# Altium footprint library FootPrintLib_9.PcbLib: 287 footprints (part 5 of 18)
Each footprint in its own frame and in the unit in brackets; x right, y up, seen from the top. Pads: shape width x height; smd on the part's side, far side on the other; paste and mask are expansions set on the pad; w line width, h text height; cw(c..) or ccw(c..) is an arc to the next point about the centre after c.
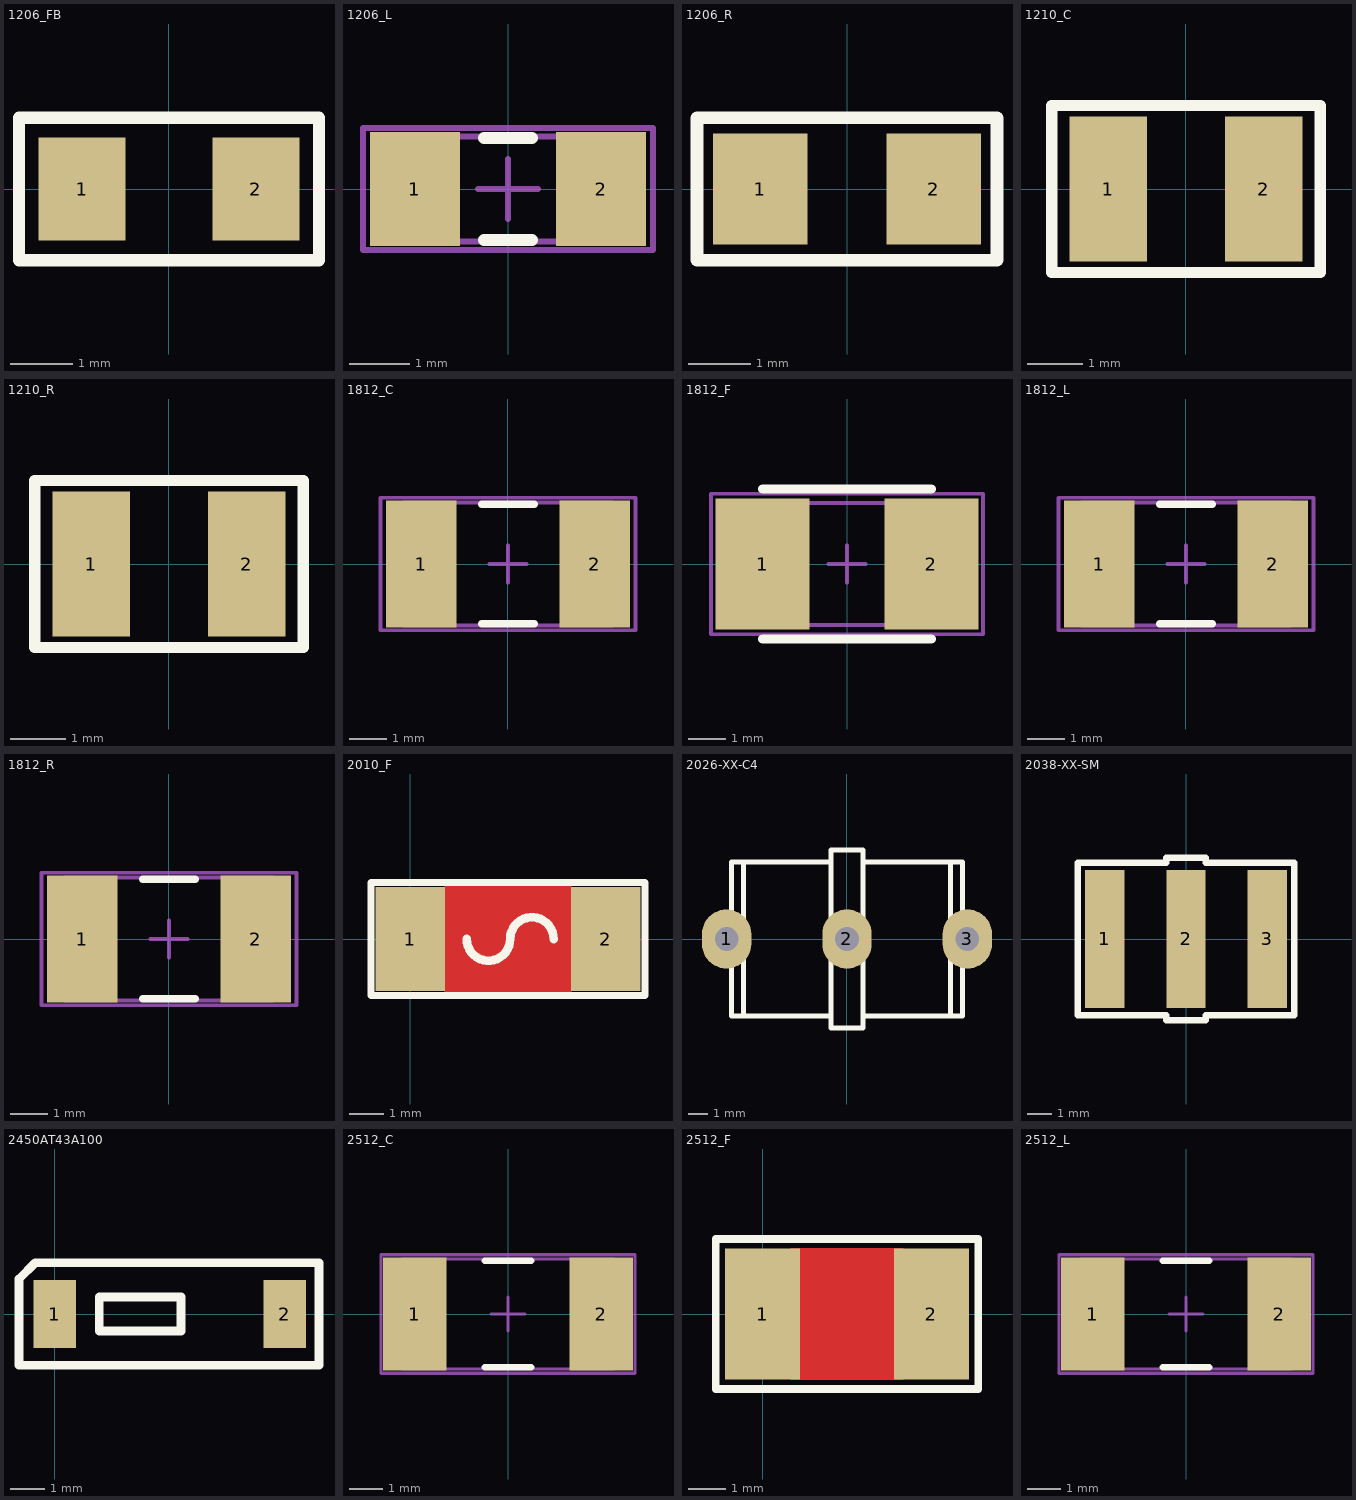
[diagram p4: the footprints below, top view; thin cyan lines are the x and y axes]

## 1206_FB [mil] "Ferrite Bead"
pads (2):
  rect 55x65 smd: 1(-55,0) 2(55,0)
Top Overlay:
  lines w7.87: -95,-45 -95,45 95,45 95,-45 -95,-45
3D body "User Library-1206 Ferrite bead.STEP": height 25.63, standoff -25.63, extent -63,-31.5 63,31.5

## 1206_L [mm] "Inductor"
height 0.71
pads (2):
  rect 1.5x1.9 smd: 1(-1.55,0) 2(1.55,0)
Top Overlay:
  lines w0.2: -0.4,-0.85 0.4,-0.85 ; -0.4,0.85 0.4,0.85
Mechanical 13:
  lines w0.1: -1.675,-0.875 1.675,-0.875 1.675,0.875 -1.675,0.875 -1.675,-0.875
Mechanical 15:
  lines w0.1: -0.5,0 0.5,0 ; 0,-0.5 0,0.5 ; -2.413,-1.016 2.413,-1.016 2.413,1.016 -2.413,1.016 -2.413,-1.016
3D body "User Library-1206(3216M) Res.step": height 1.53, standoff 0, extent -2,-0.8 2,0.8

## 1206_R [mil] "Resistor"
pads (2):
  rect 60x70 smd: 1(-55,0) 2(55,0)
Top Overlay:
  lines w7.87: -95,-45 95,-45 ; -95,45 95,45
  lines w8: -95,-45 -95,45 ; 95,-45 95,45
3D body "User Library-1206(3216M) Res.STEP": height 60.1, standoff 0, extent -78.74,-31.5 78.76,31.51

## 1210_C [mil] "Capacitor"
pads (2):
  rect 55x102.36 smd: 1(-55,0) 2(55,0)
Top Overlay:
  lines w7.87: -95,-59.06 95,-59.06 95,59.06 -95,59.06 -95,-59.06
3D body "1210 CAPACITOR.stp": height 84.41, standoff 1.74, extent -66.93,-53.15 66.92,53.15

## 1210_R [mil] "Resistor"
pads (2):
  rect 55x102.36 smd: 1(-55,0) 2(55,0)
Top Overlay:
  lines w7.87: -95,-59.06 95,-59.06 95,59.06 -95,59.06 -95,-59.06
3D body "User Library-R_1210.STEP": height 23.62, standoff 0, extent -62.98,-49.21 63,49.21

## 1812_C [mm] "Surface mount capacitor 1812"
height 1.7
pads (2):
  rect 1.9x3.4 smd: 1(-2.331,0) 2(2.331,0)
Top Overlay:
  lines w0.2: -0.7,-1.6 0.7,-1.6 ; -0.7,1.6 0.7,1.6
Mechanical 13:
  lines w0.1: -2.794,-1.651 2.794,-1.651 2.794,1.651 -2.794,1.651 -2.794,-1.651
Mechanical 15:
  lines w0.1: -0.5,0 0.5,0 ; 0,-0.5 0,0.5 ; -3.429,-1.778 3.429,-1.778 3.429,1.778 -3.429,1.778 -3.429,-1.778
3D body "User Library-1812(4532M) Cap.step": height 2.54, standoff 0, extent -2.81,-1.6 2.81,1.6

## 1812_F [mil] "Surface mount FUSE 1812"
pads (2):
  rect 100x140 smd: 1(-90,0) 2(90,0)
Top Overlay:
  lines w10: -90,-80 90,-80 ; -90,80 90,80
Mechanical 13:
  lines w3.94: -95,-65 95,-65 95,65 -95,65 -95,-65
Mechanical 15:
  lines w3.94: -19.69,0 19.68,0 ; 0,-19.68 0,19.69 ; -145,-75 -145,75 145,75 145,-75 -145,-75
3D body "User Library-FUSE-1812-GOLDEN.step": height 51.97, standoff 0, extent -94.88,-63.38 94.89,63.39

## 1812_L [mm] "Inductor"
height 1.7
pads (2):
  rect 1.9x3.4 smd: 1(-2.331,0) 2(2.331,0)
Top Overlay:
  lines w0.2: -0.7,-1.6 0.7,-1.6 ; -0.7,1.6 0.7,1.6
Mechanical 13:
  lines w0.1: -2.794,-1.651 2.794,-1.651 2.794,1.651 -2.794,1.651 -2.794,-1.651
Mechanical 15:
  lines w0.1: -0.5,0 0.5,0 ; 0,-0.5 0,0.5 ; -3.429,-1.778 3.429,-1.778 3.429,1.778 -3.429,1.778 -3.429,-1.778
3D body "User Library-1812(4532M) Res.step": height 2.54, standoff 0, extent -2.81,-1.6 2.81,1.6

## 1812_R [mm] "Resistor"
height 1.7
pads (2):
  rect 1.9x3.4 smd: 1(-2.331,0) 2(2.331,0)
Top Overlay:
  lines w0.2: -0.7,-1.6 0.7,-1.6 ; -0.7,1.6 0.7,1.6
Mechanical 13:
  lines w0.1: -2.794,-1.651 2.794,-1.651 2.794,1.651 -2.794,1.651 -2.794,-1.651
Mechanical 15:
  lines w0.1: -0.5,0 0.5,0 ; 0,-0.5 0,0.5 ; -3.429,-1.778 3.429,-1.778 3.429,1.778 -3.429,1.778 -3.429,-1.778
3D body "User Library-1812(4532M) Res.step": height 2.54, standoff 0, extent -2.81,-1.6 2.81,1.6

## 2010_F [mil]
pads (2):
  rect 80x120 smd: 1(0,0) 2(225,0)
Top Layer:
  pour cut-out: 40,65 185,65 185,-65 40,-65
Top Overlay:
  lines w8: -45,-65 270,-65 270,65 -45,65 -45,-65
  lines w10: 65,0 ccw(c90,0) 115,0 cw(c140,0) 165,0

## 2026-XX-C4 [mm] "3 Electrode Surge Arrester"
height 9
pads (3):
  oval 2.5x3 hole 1.2: 1(-6.1,0) 2(0,0) 3(6.1,0)
Top Overlay:
  lines w0.254: -5.25,-3.9 -5.25,3.9 ; -0.8,-3.9 -5.85,-3.9 -5.85,3.9 -0.8,3.9 ; 0.8,-3.9 5.85,-3.9 5.85,3.9 0.8,3.9 ; 5.25,-3.9 5.25,3.9 ; -0.8,-4.5 -0.8,4.5 0.8,4.5 0.8,-4.5 -0.8,-4.5

## 2038-XX-SM [mm] "3 Electrode Surface Mount Gas Discharge Tube"
height 5
pads (3):
  rect 1.6x5.6 smd: 1(-3.3,0) 2(0,0) 3(3.3,0)
Top Overlay:
  lines w0.254: -4.4,-3.1 -4.4,3.1 -0.8,3.1 -0.8,3.3 0.8,3.3 0.8,3.1 4.4,3.1 4.4,-3.1 0.8,-3.1 0.8,-3.3 -0.8,-3.3 -0.8,-3.1 -4.4,-3.1

## 2450AT43A100 [mm]
pads (2):
  rect 1.25x2 smd: 1(0,0) 2(6.75,0)
Top Overlay:
  lines w0.254: -1.05,-1.5 7.75,-1.5 7.75,1.5 -0.575,1.5 -1.05,1.025 -1.05,-1.5 ; 1.3,-0.5 3.7,-0.5 3.7,0.5 1.3,0.5 1.3,-0.5

## 2512_C [mm] "Surface mount capacitor 2512"
height 1.7
pads (2):
  rect 1.9x3.4 smd: 1(-2.8,0) 2(2.8,0)
Top Overlay:
  lines w0.2: -0.7,-1.6 0.7,-1.6 ; -0.7,1.6 0.7,1.6
Mechanical 13:
  lines w0.1: -3.175,-1.651 3.175,-1.651 3.175,1.651 -3.175,1.651 -3.175,-1.651
Mechanical 15:
  lines w0.1: -0.5,0 0.5,0 ; 0,-0.5 0,0.5 ; -3.81,-1.778 3.81,-1.778 3.81,1.778 -3.81,1.778 -3.81,-1.778
3D body "User Library-2512(6432M) Cap.step": height 3.21, standoff -0.01, extent -3.464,-1.61 3.464,1.615

## 2512_F [mm]
pads (2):
  rect 2x3.5 smd: 1(0,0) 2(4.5,0)
Top Layer:
  pour cut-out: 0.75,1.75 3.75,1.75 3.75,-1.75 0.75,-1.75
Top Overlay:
  lines w0.203: -1.25,-2 -1.25,2 5.75,2 5.75,-2 -1.25,-2

## 2512_L [mm] "Inductor"
height 1.7
pads (2):
  rect 1.9x3.4 smd: 1(-2.8,0) 2(2.8,0)
Top Overlay:
  lines w0.2: -0.7,-1.6 0.7,-1.6 ; -0.7,1.6 0.7,1.6
Mechanical 13:
  lines w0.1: -3.175,-1.651 -3.175,1.651 3.175,1.651 3.175,-1.651 -3.175,-1.651
Mechanical 15:
  lines w0.1: -0.5,0 0.5,0 ; 0,-0.5 0,0.5 ; -3.81,-1.778 -3.81,1.778 3.81,1.778 3.81,-1.778 -3.81,-1.778
3D body "User Library-2512(6432M) Res.step": height 0.6, standoff 0, extent -3.2,-1.6 3.2,1.6